# Altium schematic symbol library COMPONENTS.SCHLIB: 1 symbol
Pins are listed as number, name and electrical type; pins without a type are passive.

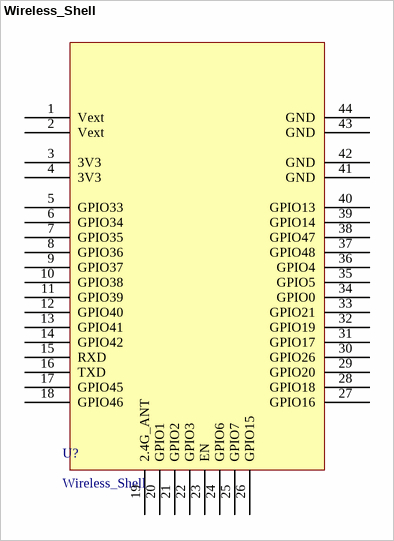
[diagram p0: symbol Wireless_Shell]

## Wireless_Shell
designator U?
footprint Esp_PICO
pins: 1 Vext, 2 Vext, 3 3V3, 4 3V3, 5 GPIO33, 6 GPIO34, 7 GPIO35, 8 GPIO36, 9 GPIO37, 10 GPIO38, 11 GPIO39, 12 GPIO40, 13 GPIO41, 14 GPIO42, 15 RXD, 16 TXD, 17 GPIO45, 18 GPIO46, 19 2.4G_ANT, 20 GPIO1, 21 GPIO2, 22 GPIO3, 23 EN, 24 GPIO6, 25 GPIO7, 26 GPIO15, 27 GPIO16, 28 GPIO18, 29 GPIO20, 30 GPIO26, 31 GPIO17, 32 GPIO19, 33 GPIO21, 34 GPIO0, 35 GPIO5, 36 GPIO4, 37 GPIO48, 38 GPIO47, 39 GPIO14, 40 GPIO13, 41 GND, 42 GND, 43 GND, 44 GND